# Altium schematic symbol library CapacitorP.SchLib: 1 symbol
Pins are listed as number, name and electrical type; pins without a type are passive.

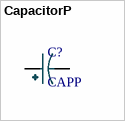
[diagram p0: symbol CapacitorP]

## CapacitorP
designator C?, comment CAPP
Cap Tant Solid SMD 3216-18 3 Ohm 125Â°C T/R; MF: AVX; MP: TAJA106K010YNJ; SnapEDA_Link: https://www.snapeda.com/parts/TAJA106K010YNJ/AVX/view-part/1683849/?ref=snap; Price: None; Value: *; Availability: Unavailable; Package: 1206 AVX
footprint TAJA
footprint TAJB
footprint TAJC
footprint TAJD
footprint TAJE
footprint CAP1000uF16VDC
pins: NEG, POS